# Altium footprint library BS_RFE_BB_20230506.PcbLib: 77 footprints (part 2 of 5)
Each footprint in its own frame and in the unit in brackets; x right, y up, seen from the top. Pads: shape width x height; smd on the part's side, far side on the other; paste and mask are expansions set on the pad; w line width, h text height; cw(c..) or ccw(c..) is an arc to the next point about the centre after c.
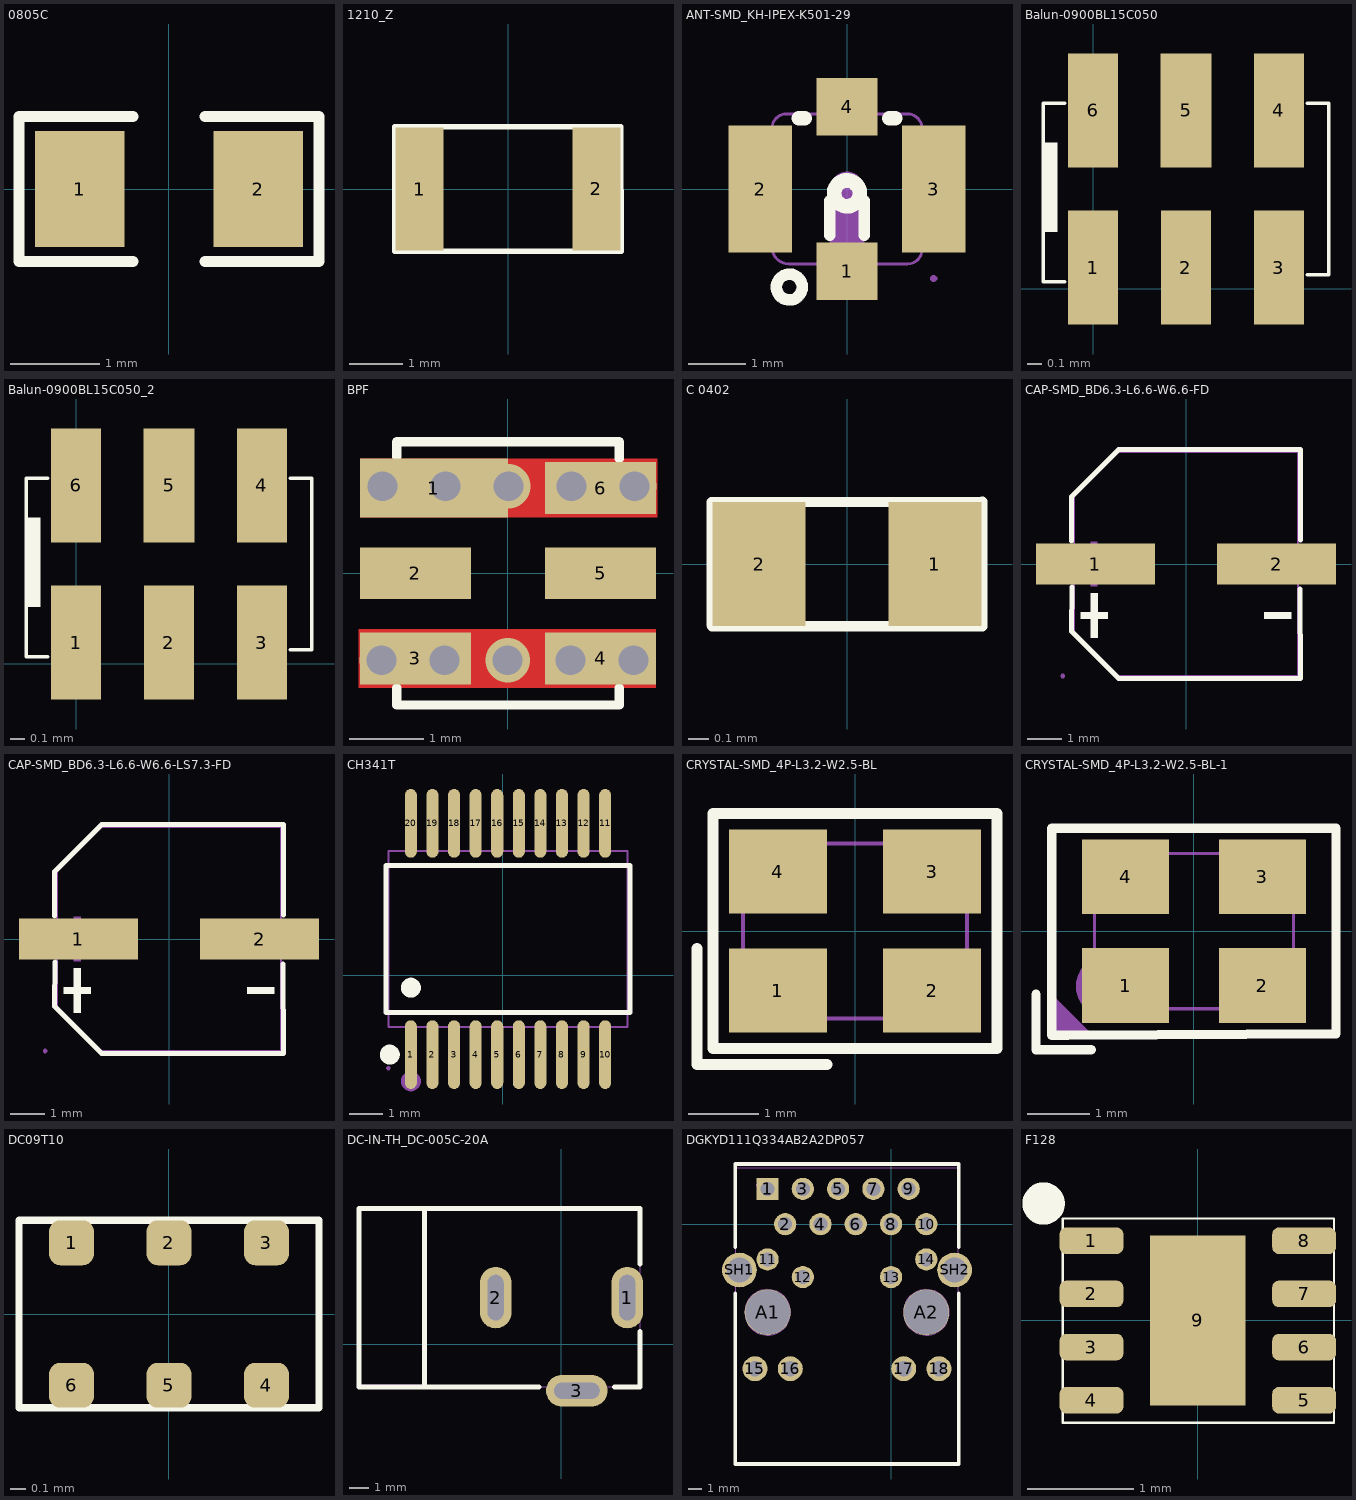
[diagram p1: the footprints below, top view; thin cyan lines are the x and y axes]

## 0805C [mm]
pads (2):
  rect 1x1.3 smd: 1(-1,0) 2(1,0)
Top Overlay:
  lines w0.127: -0.406,-0.81 -1.676,-0.81 -1.676,0.81 -0.406,0.81 ; 0.406,-0.81 1.676,-0.81 1.676,0.81 0.406,0.81

## 1210_Z [mm]
pads (2):
  rect 0.9x2.3 smd: 1(-1.65,0) 2(1.65,0)
Top Overlay:
  lines w0.1: -2.113,1.16 -2.113,-1.16 2.112,-1.16 ; -2.108,1.16 2.11,1.16 ; 2.107,1.148 2.111,-1.158
3D body: height 1.3, standoff 0, extent -1.785,-1.126 1.674,1.131

## ANT-SMD_KH-IPEX-K501-29 [mm]
pads (4):
  rect 1.05x1 smd paste+0 mask+0.051: 1(0,-1.425) 4(0,1.425)
  rect 1.1x2.2 smd paste+0 mask+0.051: 2(-1.5,0) 3(1.5,0)
Top Overlay:
  circle w0.2: c-1,-1.7 r0.224
  circle w0.254: c0,-0.075 r0.224
  lines w0.2: -0.3,-0.8 -0.3,-0.2 ; 0.3,-0.8 0.3,-0.2
  lines w0.254: -0.837,1.225 -0.731,1.225 ; 0.731,1.225 0.837,1.225
Mechanical 6:
  circle w0.3: c0,0 r0.15
  circle w0.2: c-0.3,-1.625 r0.1
  region: 0.3,-1 0.3,0 -0.3,0 -0.3,-1
Mechanical 15:
  region: 0.3,1.201 -0.3,1.201 -0.3,1.651 0.3,1.651
  region: -0.3,-1 0.3,-1 0.3,-1.551 -0.3,-1.551
  region: 1.05,-0.9 1.05,0.9 1.5,0.9 1.5,-0.9
  region: -1.05,0.9 -1.05,-0.9 -1.5,-0.9 -1.5,0.9
  region: 1.56,-1.551 1.56,-1.526 1.525,-1.491 1.475,-1.491 1.44,-1.526 1.44,-1.551 1.44,-1.576 1.475,-1.611 1.525,-1.611 1.56,-1.576 1.56,-1.551
  lines w0.051: 1.051,-1.299 ccw(c1.051,-1.05) 1.299,-1.05 1.299,-1.045 ccw(c1.299,-1.044) 1.3,-1.044 1.3,1.051 ccw(c1.05,1.051) 1.05,1.301 0.97,1.301 -1.048,1.3 -1.052,1.3 ccw(c-1.052,1.053) -1.299,1.053 -1.299,-0.924 cw(c-1.3,-0.924) -1.3,-0.925 -1.3,-1.007 ccw(c-1.008,-1.007) -1.008,-1.299 1.051,-1.299 ; 1.051,-1.299 1.051,-1.299

## Balun-0900BL15C050 [mm]
pads (6):
  rect 0.35x0.8 smd mask+0.051: 1(0,0.15) 2(0.65,0.15) 3(1.3,0.15) 4(1.3,1.25) 6(0,1.25)
  rect 0.36x0.8 smd mask+0.051: 5(0.65,1.25)
Top Overlay:
  region: -0.25,1.025 -0.35,1.025 -0.35,0.4 -0.25,0.4
  lines w0.025: -0.2,1.3 -0.35,1.3 -0.35,0.05 -0.325,0.05 -0.2,0.05 ; 1.5,1.3 1.65,1.3 1.65,0.1 1.5,0.1 ; 1.5,0.1 1.5,0.1
3D body "Balun0805-2450FB15L0001.STEP": height 0.8, standoff 0, extent -0.344,0.058 1.656,1.308

## Balun-0900BL15C050_2 [mm]
pads (6):
  rect 0.35x0.8 smd mask+0.051: 1(0,0.15) 2(0.65,0.15) 3(1.3,0.15) 4(1.3,1.25) 6(0,1.25)
  rect 0.36x0.8 smd mask+0.051: 5(0.65,1.25)
Top Overlay:
  region: -0.25,1.025 -0.35,1.025 -0.35,0.4 -0.25,0.4
  lines w0.025: -0.2,1.3 -0.35,1.3 -0.35,0.05 -0.325,0.05 -0.2,0.05 ; 1.5,1.3 1.65,1.3 1.65,0.1 1.5,0.1 ; 1.5,0.1 1.5,0.1
3D body "Balun0805-2450FB15L0001.STEP": height 0.8, standoff 0, extent -0.344,0.058 1.656,1.308

## BPF [mm]
pads (6):
  rect 2x0.8 smd: 1(-1,1.15)
  rect 1.5x0.7 smd: 2(-1.25,0) 3(-1.25,-1.15) 4(1.25,-1.15) 5(1.25,0) 6(1.25,1.15)
via 1.695,-1.175 diameter 0.6 hole 0.4
via 0.845,-1.175 diameter 0.6 hole 0.4
via -0.006,-1.175 diameter 0.6 hole 0.4
via -0.857,-1.175 diameter 0.6 hole 0.4
via -1.707,-1.175 diameter 0.6 hole 0.4
via -1.695,1.175 diameter 0.6 hole 0.4
via -0.845,1.175 diameter 0.6 hole 0.4
via 0.006,1.175 diameter 0.6 hole 0.4
via 0.857,1.175 diameter 0.6 hole 0.4
via 1.707,1.175 diameter 0.6 hole 0.4
Top Layer:
  region: 1.999,-0.75 -2.017,-0.75 -2.017,-1.549 1.999,-1.549
  rectangle: -1.999,0.75 2.017,1.549
Top Overlay:
  lines w0.127: -1.5,-1.549 -1.5,-1.778 1.5,-1.778 1.5,-1.549 ; -1.5,1.575 -1.5,1.778 1.5,1.778 1.5,1.549

## C 0402 [mm]
pads (2):
  rect 0.45x0.6 smd mask+0.051: 1(0.425,0) 2(-0.425,0)
Top Overlay:
  lines w0.05: -0.653,-0.295 -0.653,0.299 ; -0.653,0.3 0.653,0.3 ; -0.652,-0.3 0.653,-0.3 0.653,0.301
3D body "User Library-RES_1005-0402.STEP": height 0.41, standoff 0, extent -0.575,-0.275 0.575,0.275

## CAP-SMD_BD6.3-L6.6-W6.6-FD [mm]
pads (2):
  rect 3.5x1.2 smd paste+0 mask+0.051: 1(-2.67,0) 2(2.67,0)
Top Overlay:
  region: -2.805,-0.858 -2.805,-2.178 -2.607,-2.178 -2.607,-0.858
  region: -3.102,-1.419 -3.102,-1.617 -2.31,-1.617 -2.31,-1.419
  region: 3.102,-1.419 3.102,-1.617 2.31,-1.617 2.31,-1.419
  lines w0.152: -3.376,0.686 -3.376,1.98 -1.98,3.376 3.376,3.376 3.369,0.708 ; -3.362,-0.686 -3.376,-1.981 -1.981,-3.376 3.376,-3.376 3.356,-0.739
Mechanical 6:
  region: -2.81,0.66 -2.81,-0.66 -2.612,-0.66 -2.612,0.66
  region: -3.102,0.099 -3.102,-0.099 -2.31,-0.099 -2.31,0.099
  region: 3.102,0.099 3.102,-0.099 2.31,-0.099 2.31,0.099
Mechanical 15:
  region: -3.634,0.325 -1.034,0.325 -1.034,-0.325 -3.634,-0.325
  region: 1.067,0.325 3.667,0.325 3.667,-0.325 1.067,-0.325
  region: -3.574,-3.3 -3.574,-3.275 -3.609,-3.24 -3.659,-3.24 -3.694,-3.275 -3.694,-3.3 -3.694,-3.325 -3.659,-3.36 -3.609,-3.36 -3.574,-3.325 -3.574,-3.3
  lines w0.051: -3.3,-1.98 -3.3,1.98 -1.98,3.3 3.3,3.3 3.3,-3.3 -1.98,-3.3 -3.3,-1.98

## CAP-SMD_BD6.3-L6.6-W6.6-LS7.3-FD [mm]
pads (2):
  rect 3.5x1.2 smd paste+0 mask+0.051: 1(-2.67,0) 2(2.67,0)
Top Overlay:
  region: 3.102,-1.419 3.102,-1.617 2.31,-1.617 2.31,-1.419
  region: -3.102,-1.419 -3.102,-1.617 -2.31,-1.617 -2.31,-1.419
  region: -2.805,-0.858 -2.805,-2.178 -2.607,-2.178 -2.607,-0.858
  lines w0.152: -3.376,0.686 -3.376,1.98 -1.98,3.376 3.376,3.376 3.369,0.708 ; -3.362,-0.686 -3.376,-1.981 -1.981,-3.376 3.376,-3.376 3.356,-0.739
Mechanical 6:
  region: 3.102,0.099 3.102,-0.099 2.31,-0.099 2.31,0.099
  region: -3.102,0.099 -3.102,-0.099 -2.31,-0.099 -2.31,0.099
  region: -2.805,0.66 -2.805,-0.66 -2.607,-0.66 -2.607,0.66
Mechanical 15:
  region: -3.652,0.35 -1.002,0.35 -1.002,-0.35 -3.652,-0.35
  region: 0.999,0.35 3.649,0.35 3.649,-0.35 0.999,-0.35
  region: -3.592,-3.3 -3.592,-3.275 -3.627,-3.24 -3.676,-3.24 -3.712,-3.275 -3.712,-3.3 -3.712,-3.325 -3.676,-3.36 -3.627,-3.36 -3.592,-3.325 -3.592,-3.3
  lines w0.051: -3.3,-1.98 -3.3,1.98 -1.98,3.3 3.3,3.3 3.3,-3.3 -1.98,-3.3 -3.3,-1.98

## CH341T [mm]
pads (20):
  oval 0.364x2.069 smd mask+0.051: 1(-2.772,-2.394) 2(-2.122,-2.394) 3(-1.472,-2.394) 4(-0.822,-2.394) 5(-0.171,-2.394) 6(0.479,-2.394) 7(1.129,-2.394) 8(1.779,-2.394) 9(2.428,-2.394) 10(3.078,-2.394) 11(3.078,4.57) 12(2.428,4.57) 13(1.779,4.57) 14(1.129,4.57) 15(0.479,4.57) 16(-0.171,4.57) 17(-0.822,4.57) 18(-1.472,4.57) 19(-2.122,4.57) 20(-2.772,4.57)
Top Overlay:
  circle w0.3: c-2.772,-0.379 r0.15
  circle w0.3: c-3.406,-2.394 r0.15
  lines w0.152: -3.523,-1.131 -3.523,3.307 3.83,3.307 3.83,-1.131 -3.523,-1.131
Mechanical 6:
  circle w0.3: c-2.772,-3.197 r0.15
Mechanical 15:
  drawing of 45 lines, arcs and shapes, not listed

## CRYSTAL-SMD_4P-L3.2-W2.5-BL [mm]
pads (4):
  rect 1.4x1.2 smd paste+0 mask+0.051: 1(-1.1,-0.85) 2(1.1,-0.85) 3(1.1,0.85) 4(-1.1,0.85)
Top Overlay:
  lines w0.152: -2.257,-0.25 -2.257,-1.907 -0.4,-1.907 ; -2.029,-1.678 2.029,-1.678 2.029,1.679 -2.029,1.679 -2.029,-1.678
Mechanical 6:
  circle w0.36: c-1.143,-0.889 r0.18
Mechanical 15:
  region: -1.5,-0.35 -0.6,-0.35 -0.6,-1.15 -1.5,-1.15
  region: 0.6,-0.35 1.5,-0.35 1.5,-1.15 0.6,-1.15
  region: 0.6,1.15 1.5,1.15 1.5,0.35 0.6,0.35
  region: -1.5,1.15 -0.6,1.15 -0.6,0.35 -1.5,0.35
  region: -1.54,-1.25 -1.54,-1.225 -1.575,-1.19 -1.625,-1.19 -1.66,-1.225 -1.66,-1.25 -1.66,-1.275 -1.625,-1.31 -1.575,-1.31 -1.54,-1.275 -1.54,-1.25
  lines w0.051: -1.6,-1.25 1.6,-1.25 1.6,1.25 -1.6,1.25 -1.6,-1.25

## CRYSTAL-SMD_4P-L3.2-W2.5-BL-1 [mm]
pads (4):
  rect 1.4x1.2 smd mask+0.051: 1(-1.1,-0.875) 2(1.1,-0.875) 3(1.1,0.875) 4(-1.1,0.875)
Top Overlay:
  lines w0.152: -2.54,-1.016 -2.54,-1.778 -2.54,-1.905 -1.651,-1.905 ; -2.286,-1.679 -2.286,1.651 2.286,1.651 2.286,0 2.286,-1.651 -2.03,-1.679 -2.286,-1.679
Mechanical 6:
  circle w0.5: c-1.397,-0.889 r0.25
  region: -2.286,-1.016 -2.286,-1.651 -1.651,-1.651
Mechanical 15:
  region: 0.45,1.15 1.5,1.15 1.5,0.35 0.45,0.35
  region: -1.5,1.15 -0.45,1.15 -0.45,0.35 -1.5,0.35
  region: -1.5,-0.35 -0.45,-0.35 -0.45,-1.15 -1.5,-1.15
  region: 0.45,-0.35 1.5,-0.35 1.5,-1.15 0.45,-1.15
  region: -1.54,-1.25 -1.54,-1.225 -1.575,-1.19 -1.625,-1.19 -1.66,-1.225 -1.66,-1.25 -1.66,-1.275 -1.625,-1.31 -1.575,-1.31 -1.54,-1.275 -1.54,-1.25
  lines w0.051: -1.6,-1.25 1.6,-1.25 1.6,1.25 -1.6,1.25 -1.6,-1.25

## DC09T10 [mm]
pads (6):
  rrect50% 0.3x0.3 smd: 1(-0.65,0.475) 2(0,0.475) 3(0.65,0.475) 4(0.65,-0.475) 5(0,-0.475) 6(-0.65,-0.475)
Top Overlay:
  lines w0.05: -1,-0.625 1,-0.625 1,0.625 -1,0.625 -1,-0.625

## DC-IN-TH_DC-005C-20A [mm]
pads (3):
  oval 1.6x3.1 hole 0.8 slot 2.3 at 90 deg paste-2539.97 mask+0.051: 1(3.325,2.35)
  oval 1.6x3.1 hole 0.8 slot 2.3 at 90 deg copper offset 0,0.001 paste-2539.97 mask+0.051: 2(-3.324,2.35)
  oval 3.1x1.6 hole 0.8 slot 2.3 at 0 deg copper offset 0,-0.001 paste-2539.97 mask+0.051: 3(0.775,-2.349)
Top Overlay:
  lines w0.254: -10.225,6.85 3.975,6.85 ; -10.225,-2.15 -10.225,6.85 ; -10.225,-2.149 -1.125,-2.15 ; -6.925,-2.146 -6.925,6.845 ; -6.923,-2.146 -6.923,6.845 ; 2.675,-2.15 3.975,-2.15 3.975,0.649 ; 3.975,4.05 3.975,6.849
Mechanical 6:
  region: -6.725,6.95 -10.225,6.95 -10.275,6.9 -10.275,-2.2 -10.225,-2.25 -6.825,-2.25 -6.825,-2.05 -10.125,-2.05 -10.125,6.75 -6.725,6.75
Mechanical 15:
  region: -0.225,-2.5 1.775,-2.5 1.775,-2.1 -0.225,-2.1
  region: -3.45,1.85 -3.45,2.85 -3.2,2.85 -3.2,1.85
  region: 0.275,-2.2 1.275,-2.2 1.275,-2.5 0.275,-2.5
  region: 3.175,1.85 3.175,2.85 3.475,2.85 3.475,1.85
  region: 4.035,6.85 4.035,6.875 4,6.91 3.95,6.91 3.915,6.875 3.915,6.85 3.915,6.825 3.95,6.79 4,6.79 4.035,6.825 4.035,6.85
  lines w0.051: -10.225,-2.15 3.975,-2.15 3.975,6.85 -10.225,6.85 -10.225,-2.15

## DGKYD111Q334AB2A2DP057 [mm]
pads (22):
  rect 1.6x1.6 hole 1 paste-2539.97 mask+0.051: 1(-8.89,2.54)
  round 1.6 hole 1 paste-2539.97 mask+0.051: 2(-7.62,0) 3(-6.35,2.54) 4(-5.08,0) 5(-3.81,2.54) 6(-2.54,0) 7(-1.27,2.54) 8(0,0) 9(1.27,2.54) 10(2.54,0) 11(-8.89,-2.54) 12(-6.35,-3.81) 13(0,-3.81) 14(2.54,-2.54)
  round 1.8 hole 1.1 paste-2539.97 mask+0.051: 15(-9.795,-10.41) 16(-7.255,-10.41) 17(0.915,-10.41) 18(3.455,-10.41)
  round 3.3 hole 3.2 paste-2539.97 mask+0.051: A1(-8.89,-6.35) A2(2.54,-6.35)
  round 2.5 hole 1.8 paste-2539.97 mask+0.051: SH1(-10.915,-3.3) SH2(4.575,-3.3)
Top Overlay:
  lines w0.254: -11.22,-4.97 -11.22,-17.27 4.88,-17.27 4.88,-4.97 ; -11.22,-1.67 -11.22,4.33 4.88,4.33 4.881,-1.67
Mechanical 1:
  circle w0.005: c2.545,-6.35 r1.65
  circle w0.005: c-8.885,-6.35 r1.65
Mechanical 6:
  circle w1.4: c2.545,-6.35 r0.7
  circle w1.4: c-8.885,-6.35 r0.7
  circle w0.2: c-9.525,2.794 r0.1
Mechanical 15:
  region: -11.19,-3.9 -11.19,-2.7 -10.89,-2.7 -10.89,-3.9
  region: 4.55,-3.9 4.55,-2.7 4.85,-2.7 4.85,-3.9
  region: 3.155,-10.11 3.755,-10.11 3.755,-10.41 3.155,-10.41
  region: 0.615,-10.11 1.215,-10.11 1.215,-10.41 0.615,-10.41
  region: -7.539,-10.16 -6.939,-10.16 -6.939,-10.46 -7.539,-10.46
  region: -10.095,-10.11 -9.495,-10.11 -9.495,-10.41 -10.095,-10.41
  region: -9.617,2.563 -9.017,2.563 -9.017,2.263 -9.617,2.263
  region: -6.65,2.69 -6.05,2.69 -6.05,2.39 -6.65,2.39
  region: -5.38,0.15 -4.78,0.15 -4.78,-0.15 -5.38,-0.15
  region: -4.11,2.69 -3.51,2.69 -3.51,2.39 -4.11,2.39
  region: -2.84,0.15 -2.24,0.15 -2.24,-0.15 -2.84,-0.15
  region: -1.57,2.69 -0.97,2.69 -0.97,2.39 -1.57,2.39
  region: -0.3,0.15 0.3,0.15 0.3,-0.15 -0.3,-0.15
  region: 0.97,2.69 1.57,2.69 1.57,2.39 0.97,2.39
  region: -11.13,4.05 -11.13,4.075 -11.165,4.11 -11.215,4.11 -11.25,4.075 -11.25,4.05 -11.25,4.025 -11.215,3.99 -11.165,3.99 -11.13,4.025 -11.13,4.05
  lines w0.051: -11.19,-17.25 4.85,-17.25 4.85,4.05 -11.19,4.05 -11.19,-17.25

## F128 [mm]
pads (9):
  rrect50% 0.6x0.25 smd: 1(-1,0.75) 2(-1,0.25) 3(-1,-0.25) 4(-1,-0.75) 5(1,-0.75) 7(1,0.25) 8(1,0.75)
  rrect50% 0.6x0.25 smd mask+0.102: 6(1,-0.25)
  rect 0.9x1.6 smd mask+0.102: 9(0,0)
Top Overlay:
  circle w0.254: c-1.45,1.1 r0.072
  lines w0.02: -1.271,-0.962 1.281,-0.962 1.281,0.959 -1.271,0.959 -1.271,-0.962